# EAGLE library part PINHD-2X8 (library HansPinhead)
PIN HEADER
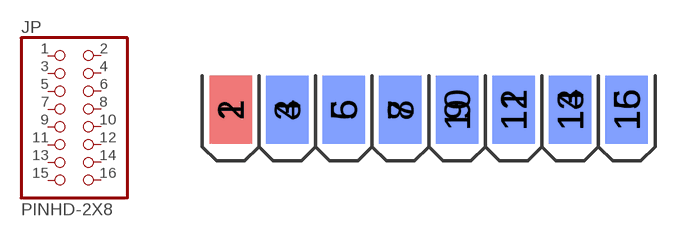
[diagram p33: symbol with the pads of 2X08; footprint 2X08]

Designator prefix JP

## PINHD-2X8  [2X08]
1  1  pas
2  2  pas
3  3  pas
4  4  pas
5  5  pas
6  6  pas
7  7  pas
8  8  pas
9  9  pas
10  10  pas
11  11  pas
12  12  pas
13  13  pas
14  14  pas
15  15  pas
16  16  pas

## Footprint 2X08 (pad centres in mm)
PIN HEADER
smd 1.905 x 3.048: 1 -8.89,-1.524; 3 -6.35,-1.524; 5 -3.81,-1.524; 7 -1.27,-1.524; 9 1.27,-1.524; 11 3.81,-1.524; 13 6.35,-1.524; 15 8.89,-1.524
smd 1.905 x 3.048 bottom: 2 -8.89,-1.524; 4 -6.35,-1.524; 6 -3.81,-1.524; 8 -1.27,-1.524; 10 1.27,-1.524; 12 3.81,-1.524; 14 6.35,-1.524; 16 8.89,-1.524